# Altium schematic symbol library 2020-05-05_05-37-53.SchLib: 2 symbols
Pins are listed as number, name and electrical type; pins without a type are passive.

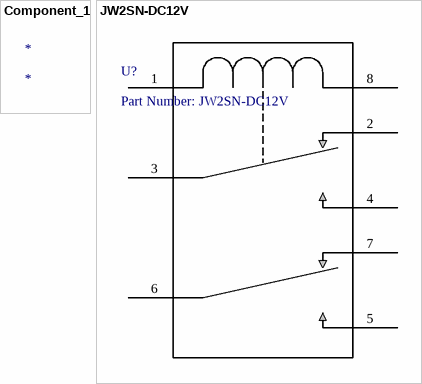
[diagram p0: symbols Component_1 to JW2SN-DC12V]

## Component_1
designator *

## JW2SN-DC12V
designator U?, comment Part Number: JW2SN-DC12V
No Description Available; Vendor: Panasonic; Built_By: EMA_UL_Team; SourceLibrary: Panasonic_2012-08-08_Relays; Manufacturer_Part_Number: JW2SN-DC12V; Copyright: Copyright (C) 2018 Accelerated Designs. All rights reserved; RefDes: RefDes; Type: DEV; Value: Value
footprint RELAY_JW2_PAN
pins: 1, 2 5, 3, 4, 5 3, 6, 7 8, 8 2